# Altium footprint library Diode$.PcbLib: 98 footprints (part 4 of 7)
Each footprint in its own frame and in the unit in brackets; x right, y up, seen from the top. Pads: shape width x height; smd on the part's side, far side on the other; paste and mask are expansions set on the pad; w line width, h text height; cw(c..) or ccw(c..) is an arc to the next point about the centre after c.
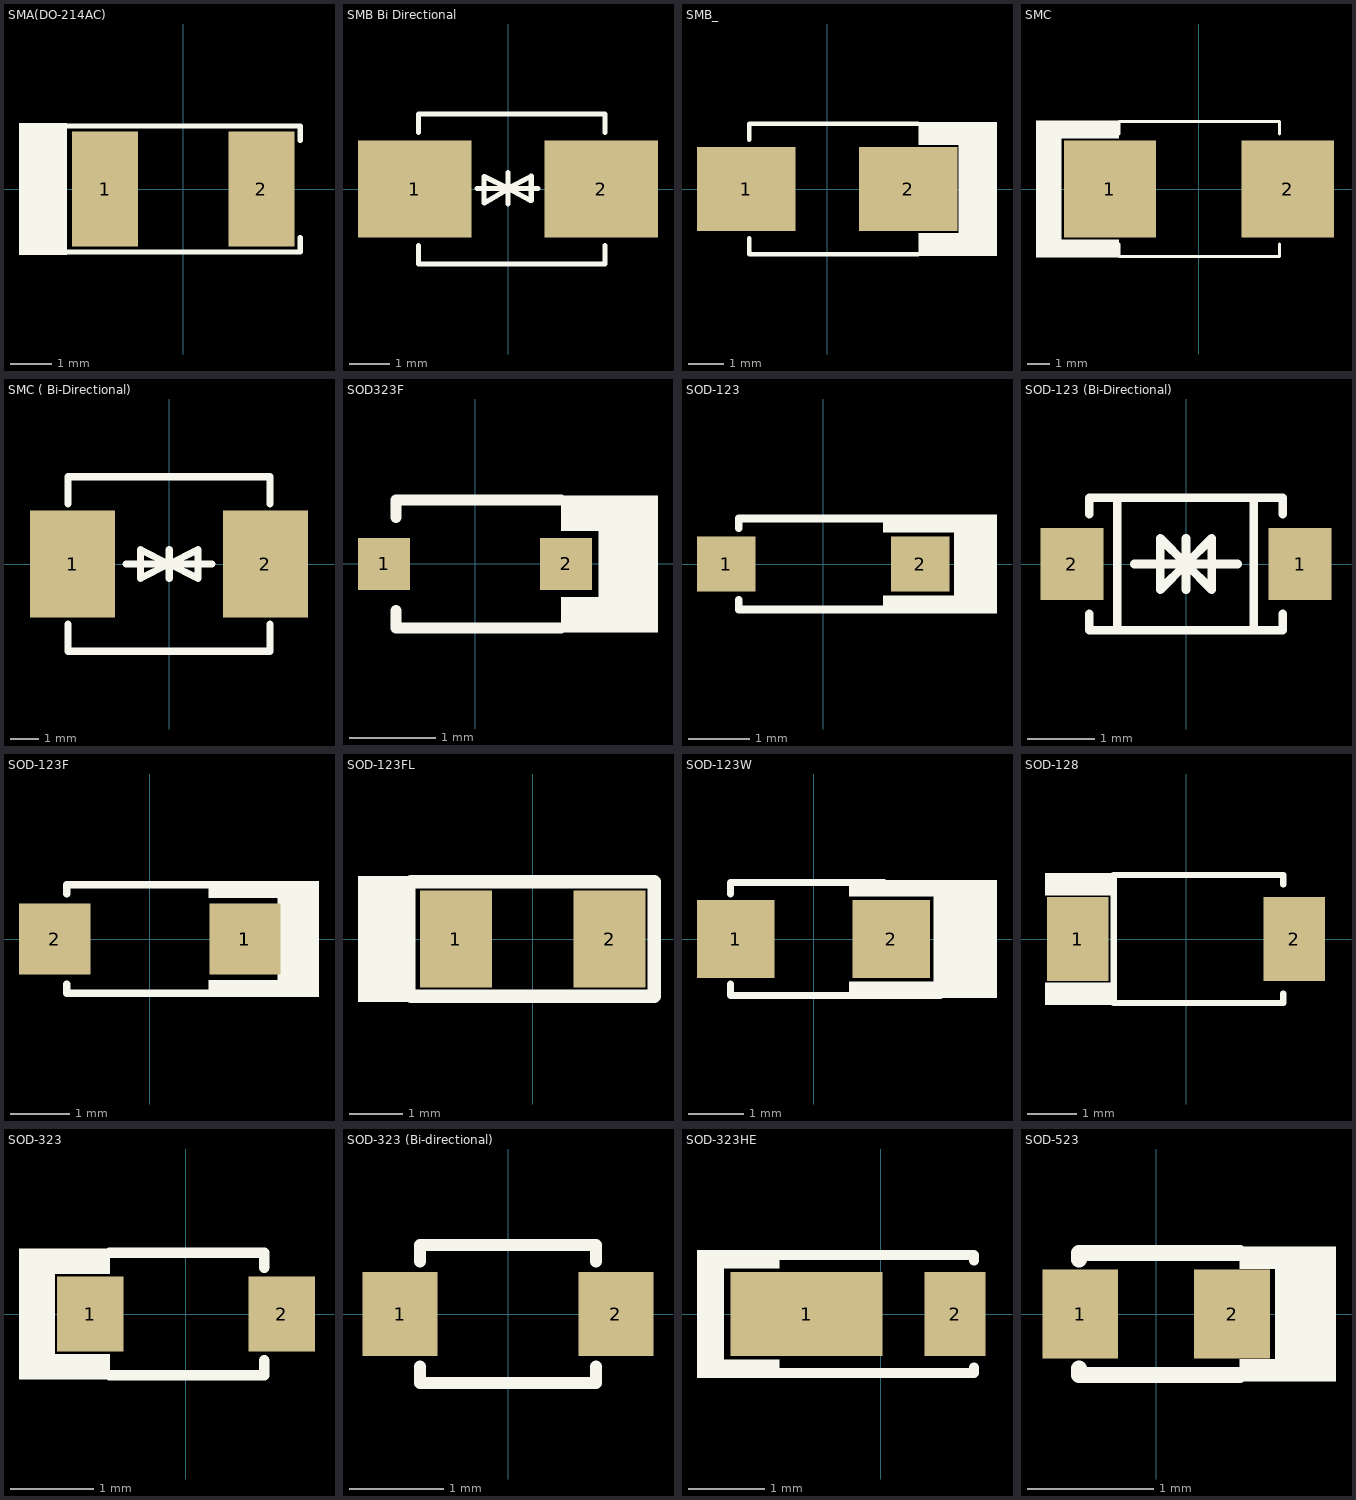
[diagram p3: the footprints below, top view; thin cyan lines are the x and y axes]

## SMA(DO-214AC) [mm]
pads (2):
  rect 1.6x2.8 smd: 1(-1.9,0) 2(1.9,0)
Top Overlay:
  rectangle: -3.992,-1.6 -2.825,1.6
  lines w0.127: -2.983,-1.533 2.842,-1.533 2.842,-1.183 ; -2.983,1.533 2.842,1.533 2.842,1.183
3D body "SMA (DO-214AC).STEP": height 2.3, standoff 0, extent -2.6,-1.45 2.6,1.45

## SMB Bi Directional [mm]
pads (2):
  rect 2.8x2.4 smd: 1(-2.3,0) 2(2.3,0)
Top Overlay:
  lines w0.127: -2.21,-1.397 -2.21,-1.854 2.388,-1.854 ; -2.21,1.397 -2.21,1.854 2.388,1.854 ; -0.758,0.008 0.732,0.008 ; 0,-0.362 0,0.019 ; 0,0.4 0,0.019 ; 0.542,-0.282 0.017,0.01 -0.588,-0.346 -0.588,0.308 0,0.019 ; 0.572,-0.282 0.572,0.318 0,0.019 ; 2.39,-1.854 2.39,-1.397 ; 2.39,1.397 2.39,1.854
3D body "User Library-DO-214AA SMB.step": height 2.3, standoff 0, extent -2.7,-1.8 2.7,1.8

## SMB_ [mm]
pads (2):
  rect 2.8x2.4 smd: 1(-2.3,0) 2(2.3,0)
Top Overlay:
  rectangle: 2.591,1.245 4.826,1.905
  rectangle: 3.734,-1.651 4.826,1.346
  rectangle: 2.591,-1.905 4.826,-1.245
  lines w0.127: -2.21,-1.397 -2.21,-1.854 2.591,-1.854 ; -2.21,1.397 -2.21,1.854 2.591,1.854
3D body "User Library-DO-214AA SMB.step": height 2.3, standoff 0, extent -2.7,-1.8 2.7,1.8

## SMC [mm]
pads (2):
  rect 4.1x4.3 smd: 1(-3.95,0) 2(3.95,0)
Top Overlay:
  rectangle: -7.239,2.235 -3.556,3.048
  rectangle: -7.239,-3.048 -3.556,-2.235
  rectangle: -7.239,-2.261 -6.096,2.261
  lines w0.127: -3.556,-2.438 -3.556,-2.997 3.581,-2.997 3.581,-2.438 ; -3.556,2.438 -3.556,2.997 3.581,2.997 3.581,2.438
3D body "User Library-DO-214AB-SMC.step": height 2.41, standoff -0.04, extent -3.9,-2.95 3.9,2.95

## SMC ( Bi-Directional) [mm]
pads (2):
  rect 3.03x3.82 smd paste+0 mask+0.051: 1(-3.435,0) 2(3.435,0)
Top Overlay:
  lines w0.254: -3.6,-2.141 -3.6,-3.11 3.6,-3.11 3.6,-2.141 ; -3.6,2.141 -3.6,3.11 3.6,3.11 3.6,2.141 ; -1.524,0 0.508,0 ; -0.496,0 1.536,0 ; 0,-0.508 0,0.508 0,0 ; 0.012,0.508 0.012,-0.508 0.012,0 ; 0,0 -1.016,0.508 -1.016,-0.508 0,0 ; 0.012,0 1.028,0.508 1.028,-0.508 0.012,0
3D body "C2831485.step": height 2.1, standoff 0, extent -4,-3 4,3

## SOD323F [mm]
pads (2):
  rect 0.6x0.6 smd: 1(-1.05,0) 2(1.05,0)
Top Overlay:
  rectangle: 1.422,-0.406 2.108,0.457
  rectangle: 0.988,-0.787 2.108,-0.381
  rectangle: 0.988,0.381 2.108,0.787
  lines w0.127: -0.914,-0.533 -0.914,-0.737 0.988,-0.737 ; -0.914,0.533 -0.914,0.737 0.988,0.737
3D body "User Library-SOD323F-1.step": height 1, standoff 0, extent -1.25,-0.675 1.25,0.675

## SOD-123 [mm]
pads (2):
  rect 0.95x0.9 smd: 1(-1.575,0) 2(1.575,0)
Top Overlay:
  rectangle: 0.965,-0.8 2.819,-0.508
  rectangle: 2.12,-0.787 2.819,0.787
  rectangle: 0.965,0.508 2.819,0.8
  lines w0.127: -1.372,-0.584 -1.372,-0.737 0.965,-0.737 ; -1.372,0.584 -1.372,0.737 0.965,0.737
3D body "1N5819HW-7-F--3DModel-STEP-56544.STEP": height 1.5, standoff -0.03, extent -1.825,-0.775 1.825,0.775

## SOD-123 (Bi-Directional) [mm]
pads (2):
  rect 0.93x1.06 smd paste+0 mask+0.051: 1(1.685,0) 2(-1.685,0)
Top Overlay:
  lines w0.127: -1.426,-0.733 -1.426,-0.976 1.426,-0.976 1.426,-0.733 ; -1.426,0.733 -1.426,0.976 1.426,0.976 1.426,0.733 ; -1.017,-0.976 -1.017,0.976 ; -0.762,0 0.762,0 ; 0,-0.381 0,0.381 ; 0.999,-0.976 0.999,0.976 ; 0,0 0.381,0.381 0.381,-0.381 0,0 ; 0,0 -0.381,-0.381 -0.381,0.381 0,0
3D body "C2684428.step": height 1.07, standoff 0, extent -1.825,-0.9 1.825,0.9

## SOD-123F [mm]
pads (3):
  rect 1.2x1.2 smd: 1(1.6,0) 1(1.6,0) 2(-1.6,0)
Top Overlay:
  rectangle: 0.99,0.686 2.844,0.978
  rectangle: 2.145,-0.787 2.844,0.787
  rectangle: 0.99,-0.978 2.844,-0.686
  lines w0.127: -1.397,-0.914 -1.397,-0.762 ; -1.397,0.762 -1.397,0.914 ; -1.372,-0.914 1.245,-0.914 ; -1.372,0.914 1.321,0.914
3D body "User Library-SOD123F.STEP": height 1.2, standoff -0.01, extent -1.85,-0.85 1.9,0.85

## SOD-123FL [mm]
pads (2):
  rect 1.34x1.8 smd: 1(-1.43,0) 2(1.43,0)
Top Overlay:
  rectangle: -3.251,-1.168 -2.184,1.168
  lines w0.254: -2.261,-1.067 2.261,-1.067 2.261,1.067 -2.261,1.067
3D body "User Library-SOD-123FL CASE 498.step": height 0.95, standoff 0, extent -1.8,-0.825 1.8,0.825

## SOD-123W [mm] "DIODE SCHOTTKY 30V 1A SOD123W"
pads (2):
  rect 1.4x1.4 smd: 1(-1.4,0) 2(1.4,0)
Top Overlay:
  region: 3.302,1.067 2.159,1.067 2.159,-1.067 3.302,-1.067
  region: 2.286,-0.762 0.635,-0.762 0.635,-1.067 2.286,-1.067
  region: 2.286,1.067 0.635,1.067 0.635,0.762 2.286,0.762
  lines w0.127: -1.499,-0.813 -1.499,-1.016 2.286,-1.016 ; -1.499,0.813 -1.499,1.016 -1.143,1.016 1.27,1.016
3D body "User Library-SOD123W.step": height 1.1, standoff -0.01, extent -2,-0.95 2,0.95

## SOD-128 [mm]
pads (2):
  rect 1.25x1.7 smd paste+0 mask+0.051: 1(-2.2,0) 2(2.2,0)
Top Overlay:
  rectangle: -2.87,0.889 -1.467,1.346
  rectangle: -2.87,-1.346 -1.467,-0.889
  lines w0.127: 1.976,-1.108 1.976,-1.301 -1.467,-1.301 -1.467,1.301 1.976,1.301 1.976,1.108
3D body "C255587.step": height 0.96, standoff 0, extent -2.35,-1.245 2.35,1.245

## SOD-323 [mm]
pads (2):
  rect 0.8x0.9 smd mask+0.055: 1(-1.15,0) 2(1.15,0)
Top Overlay:
  rectangle: -2.007,-0.508 -1.575,0.508
  rectangle: -2.007,-0.787 -0.914,-0.483
  rectangle: -2.007,0.483 -0.914,0.787
  lines w0.127: -0.914,-0.737 0.94,-0.737 0.94,-0.559 ; -0.914,0.737 0.94,0.737 0.94,0.559
3D body "User Library-SOD323-1.step": height 1.1, standoff 0, extent -1.3,-0.675 1.3,0.675

## SOD-323 (Bi-directional) [mm]
pads (2):
  rect 0.8x0.9 smd mask+0.055: 1(-1.15,0) 2(1.15,0)
Top Overlay:
  lines w0.127: -0.94,-0.737 -0.94,-0.559 ; -0.94,0.559 -0.94,0.737 ; -0.914,-0.737 0.94,-0.737 0.94,-0.559 ; -0.914,0.737 0.94,0.737 0.94,0.559
3D body "User Library-SOD323-1.step": height 1.1, standoff 0, extent -1.3,-0.675 1.3,0.675

## SOD-323HE [mm]
pads (2):
  rect 2x1.1 smd: 1(-0.975,0)
  rect 0.8x1.1 smd: 2(0.975,0)
Top Overlay:
  rectangle: -2.413,-0.737 -2.056,0.686
  rectangle: -2.413,0.596 -1.332,0.838
  rectangle: -2.413,-0.838 -1.332,-0.596
  lines w0.127: -1.332,-0.774 -0.656,-0.774 1.222,-0.774 1.222,-0.698 ; -1.332,0.774 -0.656,0.774 1.222,0.774 1.222,0.698
3D body "User Library-SOD-323HE.STEP": height 0.75, standoff -0.03, extent -1.35,-0.7 1.35,0.7

## SOD-523 [mm] "SOD-523 Schottky Barrier Diodes (SBD) ROHS"
pads (2):
  rect 0.6x0.7 smd: 1(-0.6,0) 2(0.6,0)
Top Overlay:
  rectangle: 0.94,-0.381 1.422,0.381
  rectangle: 0.66,-0.533 1.422,-0.356
  rectangle: 0.66,0.356 1.422,0.533
  lines w0.127: -0.61,-0.483 0.66,-0.483 ; -0.61,-0.482 -0.61,-0.432 ; -0.61,0.432 -0.61,0.482 ; -0.61,0.483 0.66,0.483
3D body "User Library-SOD-523F.step": height 0.7, standoff 0, extent -0.8,-0.399 0.8,0.399